# Altium schematic symbol library 20Cnts-D.SchLib: 1 symbol
Pins are listed as number, name and electrical type; pins without a type are passive.

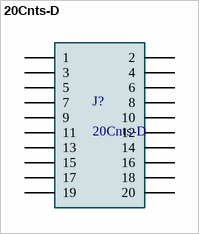
[diagram p0: symbol 20Cnts-D]

## 20Cnts-D
designator J?
Header; Pin; Vertical; Copper Alloy; Thermoplastic; 20; 0.100 x 0.100 in.; 1 A; Centerline_Pitch: 2.54 mm[.1 in]; Product_Type: Connector; MP: 103309-5; Number_of_Positions: 20; MF: TE Connectivity; Package: None; Purchase-URL: https://pricing.snapeda.com/search/part/103309-5/?ref=eda; EU_RoHS_Compliance: Not Compliant; Check_prices: https://www.snapeda.com/parts/103309-5/TE%20Connectivity%20AMP%20Connectors/view-part/202097/?ref=eda; Value: *; SnapEDA_Link: https://www.snapeda.com/parts/103309-5/TE%20Connectivity%20AMP%20Connectors/view-part/202097/?ref=snap; Price: None; Availability: In Stock
footprint 20Cnts-D
pins: 1, 2, 3, 4, 5, 6, 7, 8, 9, 10, 11, 12, 13, 14, 15, 16, 17, 18, 19, 20